# Altium footprint library BGA41C35P13X7_298X276X50.PcbLib: 1 footprints
Each footprint in its own frame and in the unit in brackets; x right, y up, seen from the top. Pads: shape width x height; smd on the part's side, far side on the other; paste and mask are expansions set on the pad; w line width, h text height; cw(c..) or ccw(c..) is an arc to the next point about the centre after c.
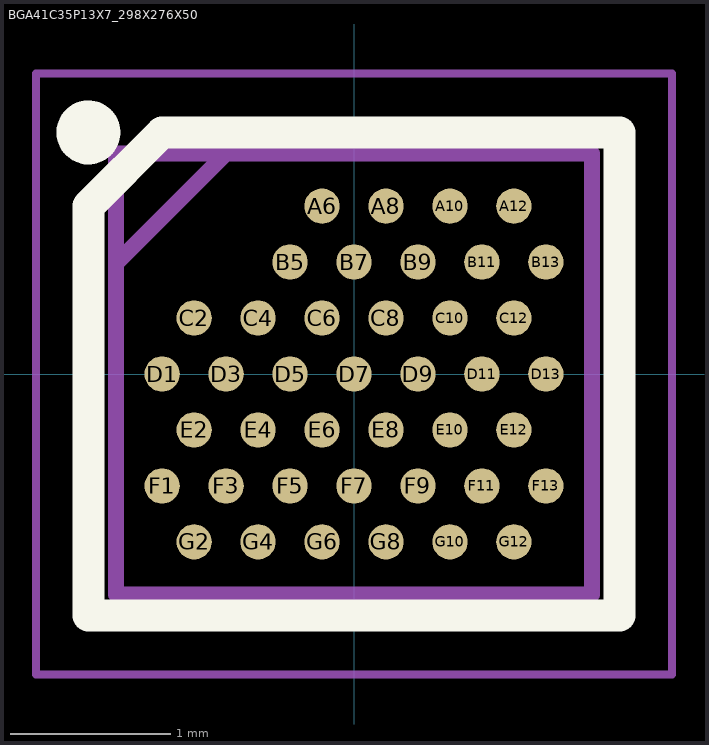
[diagram p0: the footprint, top view; thin cyan lines are the x and y axes]

## BGA41C35P13X7_298X276X50 [mm]
pads (41):
  round 0.221 smd: A6(-0.2,1.05) A8(0.2,1.05) A10(0.6,1.05) A12(1,1.05) B5(-0.4,0.7) B7(0,0.7) B9(0.4,0.7) B11(0.8,0.7) B13(1.2,0.7) C2(-1,0.35) C4(-0.6,0.35) C6(-0.2,0.35) C8(0.2,0.35) C10(0.6,0.35) C12(1,0.35) D1(-1.2,0) D3(-0.8,0) D5(-0.4,0) D7(0,0) D9(0.4,0) D11(0.8,0) D13(1.2,0) E2(-1,-0.35) E4(-0.6,-0.35) E6(-0.2,-0.35) E8(0.2,-0.35) E10(0.6,-0.35) E12(1,-0.35) F1(-1.2,-0.7) F3(-0.8,-0.7) F5(-0.4,-0.7) F7(0,-0.7) F9(0.4,-0.7) F11(0.8,-0.7) F13(1.2,-0.7) G2(-1,-1.05) G4(-0.6,-1.05) G6(-0.2,-1.05) G8(0.2,-1.05) G10(0.6,-1.05) G12(1,-1.05)
Top Overlay:
  circle w0.2: c-1.661,1.511 r0.1
  lines w0.2: -1.2,1.511 1.661,1.511 1.661,-1.51 -1.66,-1.51 -1.66,1.051 -1.199,1.512
Mechanical 15:
  lines w0.1: -1.49,0.69 -0.8,1.38 ; -1.49,-1.38 1.49,-1.38 1.49,1.38 -1.49,1.38 -1.49,-1.38
Mechanical 20:
  lines w0.05: -1.99,-1.88 1.99,-1.88 1.99,1.88 -1.99,1.88 -1.99,-1.88